# Altium schematic symbol library Universal resistor SMD.SchLib: 1 symbol
Pins are listed as number, name and electrical type; pins without a type are passive.

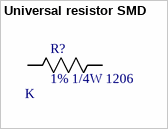
[diagram p0: symbol Universal resistor SMD]

## Universal resistor SMD
designator R?, comment 1% 1/4W 1206  value K
Resistor SMD 1206; Manufacturer: *; Manufacturer Product Number: *; Case/Package: 1206
footprint Universal resistor SMD (Footprint not found)
pins: 1, 2